# EAGLE library part PCA9570GMH (library PCA9570GMH)
NXP - PCA9570GMH - I/O EXPANDER, 4BIT, 400KHZ, XQFN-8 Source: Datasheet <http://www.nxp.com/docs/en/data-sheet/PCA9570.pdf>
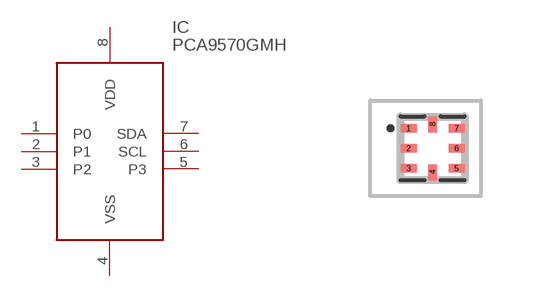
[diagram p0: symbol with the pads of PCA9570GMH; footprint PCA9570GMH]

Designator prefix IC

## PCA9570GMH (Arrow_Part_Number: PCA9570GMH; Arrow_Price-Stock: https://www.arrow.com/en/products/pca9570gmh/nxp-semiconductors?utm_currency=USD&region=nac; Description: NXP - PCA9570GMH - I/O EXPANDER, 4BIT, 400KHZ, XQFN-8; Height: mm; Manufacturer_Name: NXP; Manufacturer_Part_Number: PCA9570GMH; Mouser_Part_Number: 771-PCA9570GMH; Mouser_Price-Stock: https://www.mouser.co.uk/ProductDetail/NXP-Semiconductors/PCA9570GMH?qs=fi7yB2oewZl3pcYR0nNFiw%3D%3D)  [PCA9570GMH]
1  P0
2  P1
3  P2
4  VSS
5  P3
6  SCL
7  SDA
8  VDD

## Footprint PCA9570GMH (pad centres in mm)
XQFN8 (SOT902-2)
smd 0.4 x 0.22: 1 -0.6,0.5; 2 -0.6,0; 3 -0.6,-0.5; 5 0.6,-0.5; 6 0.6,0; 7 0.6,0.5
smd 0.22 x 0.4: 4 0,-0.6; 8 0,0.6